# Altium footprint library Power_vac.PcbLib: 50 footprints (part 4 of 4)
Each footprint in its own frame and in the unit in brackets; x right, y up, seen from the top. Pads: shape width x height; smd on the part's side, far side on the other; paste and mask are expansions set on the pad; w line width, h text height; cw(c..) or ccw(c..) is an arc to the next point about the centre after c.
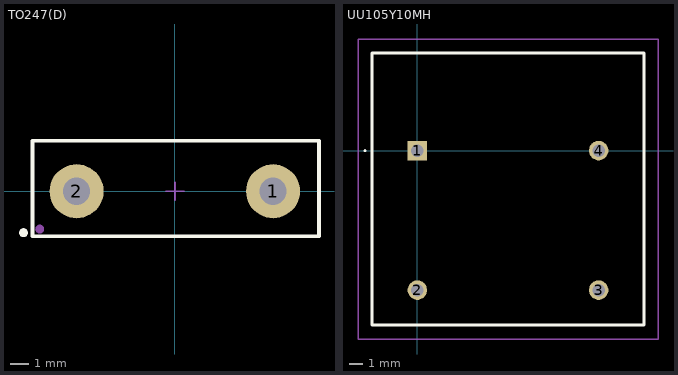
[diagram p3: the footprints below, top view; thin cyan lines are the x and y axes]

## TO247(D) [mm] "3-Lead Plastic TO-247"
height 20
pads (4):
  round 3 hole 1.5: 1(5.45,0) 2(-5.45,0)
  round 0.5 on Top Overlay: ""(-8.4,-2.3)
  round 0.5 on Mech1: ""(-7.5,-2.1)
Top Overlay:
  lines w0.2: -7.9,-2.5 8,-2.5 8,2.8 -7.9,2.8 -7.9,-2.5
Mechanical 1:
  lines w0.1: -7.9,-2.5 8,-2.5 8,2.8 -7.9,2.8 -7.9,-2.5
Mechanical 15:
  lines w0.1: -0.5,0 0.5,0 ; 0,-0.5 0,0.5 ; -7.9,-2.5 -7.9,2.8 8,2.8 8,-2.5 -7.9,-2.5
3D body "User Library-User Library-TO-247_NO_CENTER_LEAD.STEP": height 30.5, standoff -5.9, extent -7.95,-2.5 7.95,2.81

## UU105Y10MH [mm]
pads (4):
  rect 1.4x1.4 hole 0.9: 1(0,0)
  round 1.4 hole 0.9: 2(0,-10) 3(13,-10) 4(13,0)
Top Overlay:
  lines w0.1: -3.8,0 cw(c-3.75,0) -3.7,0 cw(c-3.75,0) -3.8,0
  lines w0.2: -3.25,-12.5 16.25,-12.5 16.25,7 -3.25,7 -3.25,-12.5
Mechanical 13:
  lines w0.1: -3.25,-12.5 16.25,-12.5 16.25,7 -3.25,7 -3.25,-12.5
Mechanical 15:
  lines w0.1: -4.25,-13.5 17.25,-13.5 17.25,8 -4.25,8 -4.25,-13.5
3D body "UU10.5Y-10MH.stp": height 17.1, standoff -5, extent -3.25,-12.5 16.25,7